# Altium footprint library 67996-206HLF.PcbLib: 1 footprints
Each footprint in its own frame and in the unit in brackets; x right, y up, seen from the top. Pads: shape width x height; smd on the part's side, far side on the other; paste and mask are expansions set on the pad; w line width, h text height; cw(c..) or ccw(c..) is an arc to the next point about the centre after c.
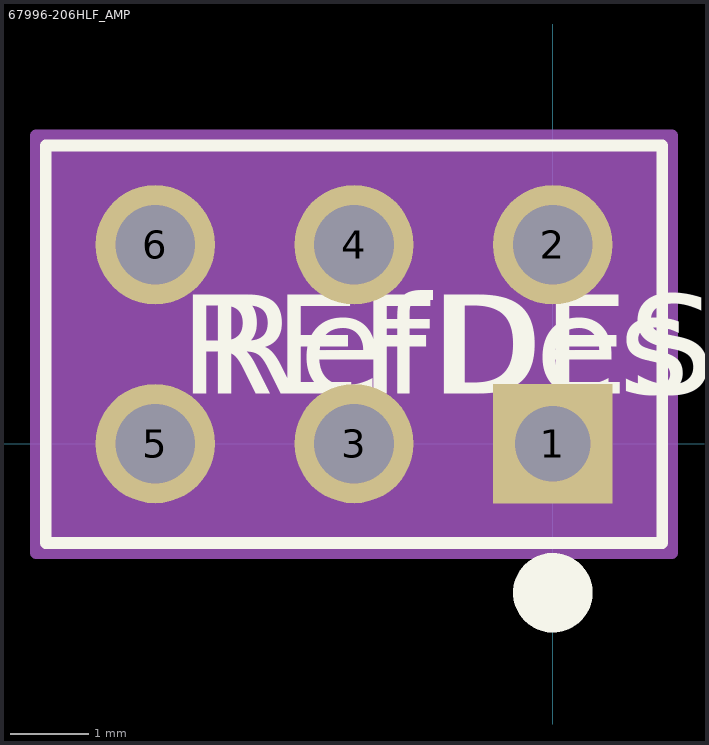
[diagram p0: the footprint, top view; thin cyan lines are the x and y axes]

## 67996-206HLF_AMP [mil]
pads (6):
  rect 60x60 / inner round 60 / far side rect 60x60 hole 38 paste-99999 mask+0: 1(0,0)
  round 60 hole 40 paste-99999 mask+0: 2(0,100) 3(-100,0) 4(-100,100) 5(-200,0) 6(-200,100)
Top Overlay:
  circle w20: c0,-75 r10
  lines w6: -255,-50 -255,150 55,150 55,-50 -255,-50
  text "REFDES" at -187.5,25 h50
  text "RefDes" at -175,25 h50
Mechanical 13:
  circle w0: c0,-30 r10
  lines w1: -250,-45 -250,145 50,145 50,-45 -250,-45
  text "RefDes2" at -187.5,25 h50
Mechanical 15:
  region: 60,155 -260,155 -260,-55 60,-55
  lines w6: -260,-55 60,-55 60,155 -260,155 -260,-55
3D body "67996-206HLF_AMP.step": height 350, standoff -200, extent -250,-50 50,150
3D body "67996-206HLF_AMP.step": height 350, standoff -200, extent -250,-50 50,150